# Altium footprint library Components - 26.10.26 - 20.34.PcbLib: 4 footprints
Each footprint in its own frame and in the unit in brackets; x right, y up, seen from the top. Pads: shape width x height; smd on the part's side, far side on the other; paste and mask are expansions set on the pad; w line width, h text height; cw(c..) or ccw(c..) is an arc to the next point about the centre after c.
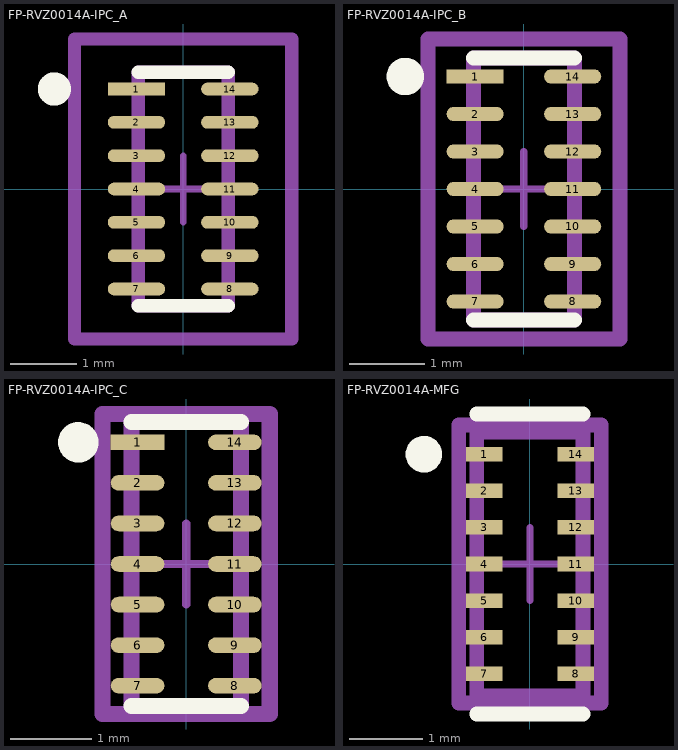
[diagram p0: the footprints below, top view; thin cyan lines are the x and y axes]

## FP-RVZ0014A-IPC_A [mm]
pads (14):
  rect 0.861x0.192 smd paste+0 mask+0: 1(-0.701,1.5)
  rrect100% 0.861x0.192 smd paste+0 mask+0: 2(-0.701,1) 3(-0.701,0.5) 4(-0.701,0) 5(-0.701,-0.5) 6(-0.701,-1) 7(-0.701,-1.5) 8(0.701,-1.5) 9(0.701,-1) 10(0.701,-0.5) 11(0.701,0) 12(0.701,0.5) 13(0.701,1) 14(0.701,1.5)
Top Overlay:
  circle w0.25: c-1.931,1.5 r0.125
  lines w0.2: -0.675,-1.75 -0.675,-1.75 ; -0.675,-1.75 0.675,-1.75 ; -0.675,1.75 -0.675,1.75 ; -0.675,1.75 0.675,1.75 ; 0.675,-1.75 0.675,-1.75 ; 0.675,1.75 0.675,1.75
Top Assembly:
  lines w0.2: -1.631,-2.25 1.631,-2.25 1.631,2.25 -1.631,2.25 -1.631,-2.25
  text ".Designator" at 0,-0.001 h1
Top 3D Body:
  lines w0.2: -0.675,-1.75 0.675,-1.75 0.675,1.75 -0.675,1.75 -0.675,-1.75
Top Courtyard:
  lines w0.2: -1.631,-2.25 1.631,-2.25 1.631,2.25 -1.631,2.25 -1.631,-2.25
Top Component Center:
  lines w0.1: -0.5,0 0.5,0 ; 0,-0.5 0,0.5
3D body "IC_Texas_Instruments_TPD6E05U06RVZR_eec.STEP": height 0.25, standoff 0, extent -1.631,-2.25 1.631,2.25

## FP-RVZ0014A-IPC_B [mm]
pads (14):
  rect 0.761x0.192 smd paste+0 mask+0: 1(-0.651,1.5)
  rrect100% 0.761x0.192 smd paste+0 mask+0: 2(-0.651,1) 3(-0.651,0.5) 4(-0.651,0) 5(-0.651,-0.5) 6(-0.651,-1) 7(-0.651,-1.5) 8(0.651,-1.5) 9(0.651,-1) 10(0.651,-0.5) 11(0.651,0) 12(0.651,0.5) 13(0.651,1) 14(0.651,1.5)
Top Overlay:
  circle w0.25: c-1.581,1.5 r0.125
  lines w0.2: -0.675,-1.75 -0.675,-1.75 ; -0.675,-1.75 0.675,-1.75 ; -0.675,1.75 -0.675,1.75 ; -0.675,1.75 0.675,1.75 ; 0.675,-1.75 0.675,-1.75 ; 0.675,1.75 0.675,1.75
Top Assembly:
  lines w0.2: -1.281,-2 1.281,-2 1.281,2 -1.281,2 -1.281,-2
  text ".Designator" at 0,-0.001 h1
Top 3D Body:
  lines w0.2: -0.675,-1.75 0.675,-1.75 0.675,1.75 -0.675,1.75 -0.675,-1.75
Top Courtyard:
  lines w0.2: -1.281,-2 1.281,-2 1.281,2 -1.281,2 -1.281,-2
Top Component Center:
  lines w0.1: -0.5,0 0.5,0 ; 0,-0.5 0,0.5
3D body "IC_Texas_Instruments_TPD6E05U06RVZR_eec.STEP": height 0.25, standoff 0, extent -1.281,-2 1.281,2

## FP-RVZ0014A-IPC_C [mm]
pads (14):
  rect 0.661x0.192 smd paste+0 mask+0: 1(-0.601,1.5)
  rrect100% 0.661x0.192 smd paste+0 mask+0: 2(-0.601,1) 3(-0.601,0.5) 4(-0.601,0) 5(-0.601,-0.5) 6(-0.601,-1) 7(-0.601,-1.5) 8(0.601,-1.5) 9(0.601,-1) 10(0.601,-0.5) 11(0.601,0) 12(0.601,0.5) 13(0.601,1) 14(0.601,1.5)
Top Overlay:
  circle w0.25: c-1.331,1.5 r0.125
  lines w0.2: -0.675,-1.75 -0.675,-1.75 ; -0.675,-1.75 0.675,-1.75 ; -0.675,1.75 -0.675,1.75 ; -0.675,1.75 0.675,1.75 ; 0.675,-1.75 0.675,-1.75 ; 0.675,1.75 0.675,1.75
Top Assembly:
  lines w0.2: -1.031,-1.85 1.031,-1.85 1.031,1.85 -1.031,1.85 -1.031,-1.85
  text ".Designator" at 0,-0.001 h1
Top 3D Body:
  lines w0.2: -0.675,-1.75 0.675,-1.75 0.675,1.75 -0.675,1.75 -0.675,-1.75
Top Courtyard:
  lines w0.2: -1.031,-1.85 1.031,-1.85 1.031,1.85 -1.031,1.85 -1.031,-1.85
Top Component Center:
  lines w0.1: -0.5,0 0.5,0 ; 0,-0.5 0,0.5
3D body "IC_Texas_Instruments_TPD6E05U06RVZR_eec.STEP": height 0.25, standoff 0, extent -1.031,-1.85 1.031,1.85

## FP-RVZ0014A-MFG [mm]
pads (14):
  rect 0.5x0.2 smd paste+0 mask+0: 1(-0.625,1.5) 2(-0.625,1) 3(-0.625,0.5) 4(-0.625,0) 5(-0.625,-0.5) 6(-0.625,-1) 7(-0.625,-1.5) 8(0.625,-1.5) 9(0.625,-1) 10(0.625,-0.5) 11(0.625,0) 12(0.625,0.5) 13(0.625,1) 14(0.625,1.5)
Top Overlay:
  circle w0.25: c-1.45,1.5 r0.125
  lines w0.2: -0.725,-2.05 0.725,-2.05 ; -0.725,2.05 0.725,2.05
Top Assembly:
  lines w0.2: -0.975,-1.9 0.975,-1.9 0.975,1.9 -0.975,1.9 -0.975,-1.9
  text ".Designator" at 0,0.188 h1
Top 3D Body:
  lines w0.2: -0.725,-1.8 0.725,-1.8 0.725,1.8 -0.725,1.8 -0.725,-1.8
Top Courtyard:
  lines w0.2: -0.975,-1.9 0.975,-1.9 0.975,1.9 -0.975,1.9 -0.975,-1.9
Top Component Center:
  lines w0.1: -0.5,0 0.5,0 ; 0,-0.5 0,0.5
3D body "IC_Texas_Instruments_TPD6E05U06RVZR_eec.STEP": height 0.25, standoff 0, extent -0.975,-1.9 0.975,1.9